# Altium footprint library Propia.PcbLib: 378 footprints (part 17 of 24)
Each footprint in its own frame and in the unit in brackets; x right, y up, seen from the top. Pads: shape width x height; smd on the part's side, far side on the other; paste and mask are expansions set on the pad; w line width, h text height; cw(c..) or ccw(c..) is an arc to the next point about the centre after c.
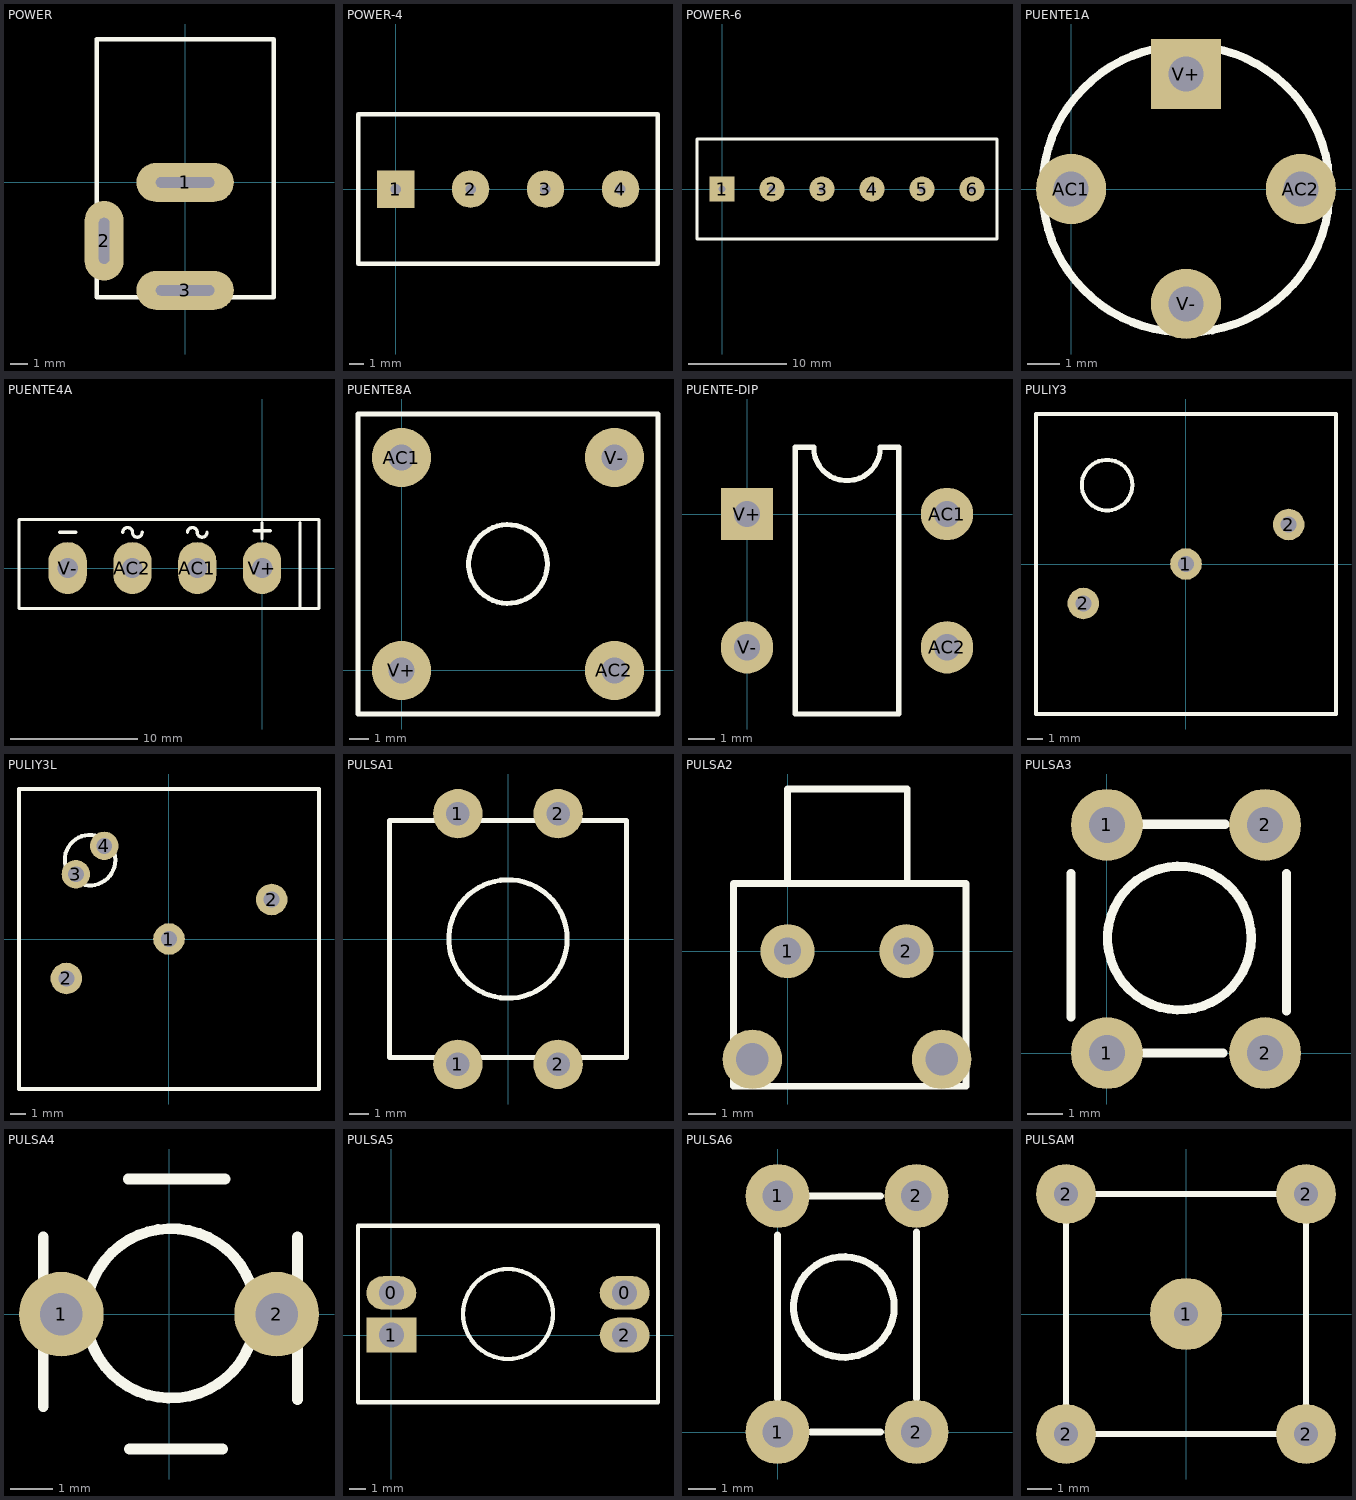
[diagram p16: the footprints below, top view; thin cyan lines are the x and y axes]

## POWER [mm]
pads (3):
  oval 5.5x2.2 hole 0.6 slot 3.3 at 0 deg: 1(0,0) 3(0,-6.096)
  oval 2.2x4.5 hole 0.6 slot 2.6 at 90 deg: 2(-4.572,-3.302)
TopOverlay:
  lines w0.254: 0,-6.5 -5,-6.5 -5,8.1 -4.99,8.09 5,8.09 5,-6.5 0.01,-6.5
Mechanical1:
  lines w0.254: -4.572,-4.318 -4.572,-3.302 -4.572,-2.286 ; -1.27,-6.096 0,-6.096 1.27,-6.096 ; -1.27,0 0,0 1.27,0

## POWER-4 [mil]
pads (4):
  rect 100x100 hole 28: 1(0,0)
  round 100 hole 28: 2(200,0) 3(400,0) 4(600,0)
TopOverlay:
  lines w12: -100,-200 700,-200 700,200 -100,200 -100,-200

## POWER-6 [mil]
pads (6):
  rect 100x100 hole 28: 1(0,0)
  round 100 hole 28: 2(200,0) 3(400,0) 4(600,0) 5(800,0) 6(1000,0)
TopOverlay:
  lines w12: -100,-200 1100,-200 1100,200 -100,200 -100,-200

## PUENTE1A [mm]
pads (4):
  round 2.2 hole 1.1: AC1(0,0) AC2(7.2,0) V-(3.6,-3.6)
  rect 2.2x2.2 hole 1.1: V+(3.6,3.6)
TopOverlay:
  circle w0.254: c3.6,0 r4.5

## PUENTE4A [mm]
pads (4):
  oval 3x4.064 hole 1.6: AC1(-5.08,0) AC2(-10.16,0) V+(0,0) V-(-15.24,0)
TopOverlay:
  lines w0.254: -15.875,2.794 -14.605,2.794 ; -10.922,2.794 cw(c-10.541,2.794) -10.16,2.794 ccw(c-9.779,2.794) -9.398,2.794 ; -5.842,2.794 cw(c-5.461,2.794) -5.08,2.794 ccw(c-4.699,2.794) -4.318,2.794 ; -0.635,2.921 0.635,2.921 ; 0,2.286 0,3.556 ; 2.98,-3.18 2.98,3.57 ; -19.05,-3.175 4.46,-3.175 4.46,3.81 -19.05,3.81 -19.05,-3.175

## PUENTE8A [mm]
pads (4):
  round 3 hole 1.3: AC1(0,10.82) AC2(10.82,0) V+(0,0) V-(10.82,10.82)
TopOverlay:
  circle w0.254: c5.41,5.41 r2
  lines w0.254: -2.21,-2.21 -2.21,13.03 13.03,13.03 13.03,-2.21 -2.21,-2.21

## PUENTE-DIP [mm]
pads (4):
  round 2 hole 1: AC1(7.62,0) AC2(7.62,-5.08) V-(0,-5.08)
  rect 2x2 hole 1: V+(0,0)
TopOverlay:
  lines w0.2: 1.835,-7.62 5.785,-7.62 5.785,2.54 5.08,2.54 cw(c3.81,2.54) 2.54,2.54 1.835,2.54 1.835,-7.62

## PULIY3 [mm]
pads (3):
  round 2 hole 1: 1(0,0) 2(-6.5,-2.5) 2(6.5,2.5)
TopOverlay:
  circle w0.254: c-5,5 r1.6
  lines w0.254: -9.5,-9.5 9.5,-9.5 9.5,9.5 -9.5,9.5 -9.5,-9.5

## PULIY3L [mm]
pads (5):
  round 2 hole 1: 1(0,0) 2(-6.5,-2.5) 2(6.5,2.5)
  round 1.8 hole 1: 3(-5.898,4.102) 4(-4.102,5.898)
TopOverlay:
  circle w0.254: c-5,5 r1.6
  lines w0.254: -9.5,-9.5 -9.5,9.5 9.5,9.5 9.5,-9.5 -9.5,-9.5

## PULSA1 [mm]
pads (4):
  round 2.5 hole 1.2: 1(-2.54,-6.35) 1(-2.54,6.35) 2(2.54,-6.35) 2(2.54,6.35)
TopOverlay:
  circle w0.254: c0,0 r3
  lines w0.254: -6,-6 6,-6 6,6 -6,6 -6,-6

## PULSA2 [mm]
pads (4):
  round 2 hole 1: 1(0,0) 2(4.4,0)
  round 2.2 hole 1.2: ""(-1.3,-4) ""(5.7,-4)
TopOverlay:
  lines w0.254: 0,2.5 0,6 4.43,6 4.43,2.53 ; -2,-5 6.6,-5 6.6,2.5 -2,2.5 -2,-5

## PULSA3 [mm]
pads (4):
  round 2 hole 1: 1(0,0) 1(0,6.35) 2(4.4,0) 2(4.4,6.35)
TopOverlay:
  circle w0.254: c2.016,3.2 r2
  lines w0.254: -1,1 -1,5 ; 1.01,6.37 3.29,6.37 ; 1.04,0 3.23,0 ; 5,1.17 5,5

## PULSA4 [mm]
pads (2):
  round 2 hole 1: 1(-2.54,0) 2(2.54,0)
TopOverlay:
  circle w0.254: c0.046,0.02 r2
  lines w0.254: -2.97,-2.18 -2.97,1.82 ; -0.96,3.19 1.32,3.19 ; -0.93,-3.18 1.26,-3.18 ; 3.03,-2.01 3.03,1.82

## PULSA5 [mm]
pads (4):
  oval 3x2 hole 1.5: 0(0,2.54) 0(14,2.54)
  rect 3x2.1 hole 1.5: 1(0,0)
  oval 3x2.1 hole 1.5: 2(14,0)
TopOverlay:
  circle w0.254: c7,1.27 r2.695
  lines w0.254: -2,-4.03 -2,6.57 16,6.57 16,-4.03 -2,-4.03

## PULSA6 [mm]
pads (4):
  round 2.3 hole 1.1: 1(0,0) 1(0,8.5) 2(5,0) 2(5,8.5)
TopOverlay:
  circle w0.254: c2.389,4.5 r1.811
  lines w0.254: 0,1.2 0,7.1 ; 1.1,8.5 3.7,8.5 ; 1.2,0 3.7,0 ; 5,1.2 5,7.2

## PULSAM [mm]
pads (5):
  round 3 hole 1: 1(0,0)
  round 2.5 hole 1: 2(-5,-5) 2(-5,5) 2(5,-5) 2(5,5)
TopOverlay:
  lines w0.254: -5,-5 5,-5 5,5 -5,5 -5,-5